# Altium schematic symbol library RK3566_.SCHLIB: 107 symbols (part 1 of 3)
Pins are listed as number, name and electrical type; pins without a type are passive.

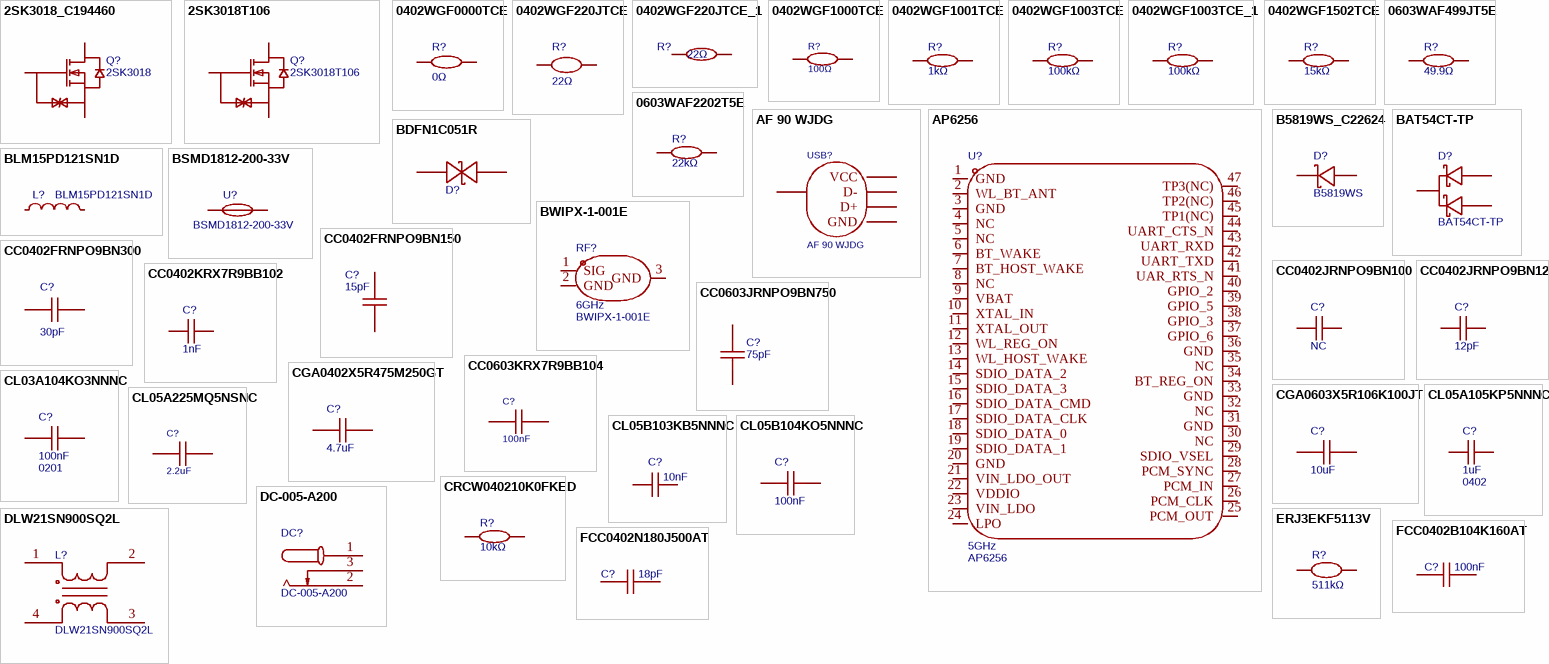
[diagram p0: symbols 2SK3018_C194460 to FCC0402N180J500AT]

## 2SK3018_C194460
designator Q?, comment 2SK3018
类型:N沟道;漏源电压(Vdss):30V;连续漏极电流(Id):100mA;功率(Pd):200mW;导通电阻(RDS(on)@Vgs,Id):8Ω@4V,10mA;阈值电压(Vgs(th)@Id):1.5V@100uA;; Manufacturer: CJ(江苏长电/长晶); Symbol: 2SK3018_C194460; 3D Model: 59529c0d6fc749f28f2d0659e12986b4; 3D Model Transform: 78.74,82.677,0,90,0,0,0.0005,0,0; Type: N沟道; Drain Source Voltage (Vdss): 30V; Continuous Drain Current (Id): 100mA; Power Dissipation (Pd): 200mW; AddInBom: yes; ModelName: SOT-323-3_L2.0-W1.3-H1.0-LS2.1-P1.30; Device: 2SK3018_C194460; LCSC Part Name: N沟道 30V 100mA; Supplier Part: C194460; Manufacturer Part: 2SK3018; Supplier Footprint: SOT-323-3; JLCPCB Part Class: Extended Part; Datasheet: https://atta.szlcsc.com/upload/public/pdf/source/20180612/C194460_7DCC01674DB4E554C67F4CC0517F82F1.pdf; Supplier: LCSC; Drain Source On Resistance (RDS(on)@Vgs,Id): 8Ω@4V,10mA; Gate Threshold Voltage (Vgs(th)@Id): 1.5V@100uA; ConvertToPcb: yes; FootprintName: SOT-323-3_L2.0-W1.3-P1.30-LS2.1-BR
footprint SOT-323-3_L2.0-W1.3-P1.30-LS2.1-BR
3D model SOT-323-3_L2.0-W1.3-H1.0-LS2.1-P1.30
pins: 1 G, 2 S, 3 D

## 2SK3018T106
designator Q?
数量:1个N沟道;漏源电压(Vdss):30V;连续漏极电流(Id):100mA;导通电阻(RDS(on)):13Ω@2.5V;耗散功率(Pd):200mW;阈值电压(Vgs(th)):1.5V;; Manufacturer: ROHM(罗姆); AddInBom: yes; ModelId: 16cdee8f029a4e608a375d4e8ff80303聨0819f05c4eef4c71ace90d822a990e87; ModelName: SOT-323_L2.0-W1.3-P1.30-LS2.1-TR; ModelTransform: 82.677,78.74,0,0,0,0,0,0,0; Number: 1个N沟道; Drain to Source Voltage: 30V; Current - Continuous Drain(Id): 100mA; Pd - Power Dissipation: 200mW; Gate Threshold Voltage (Vgs(th)): 1.5V; Input Capacitance(Ciss): 13pF; Reverse Transfer Capacitance (Crss@Vds): 4pF; Type: N沟道; Output Capacitance(Coss): 9pF; Vgs: ±20V; Symbol: 2SK3018T106; Device: 2SK3018T106; LCSC Part Name: 1个N沟道 耐压:30V 电流:100mA; SupplierPart: C113315; ManufacturerPart: 2SK3018T106; Supplier Footprint: SOT-323; JLCPCB Part Class: Extended Part; Datasheet: https://item.szlcsc.com/datasheet/2SK3018T106/114550.html; Supplier: LCSC; ConvertToPcb: yes; FootprintName: SOT-323_L2.0-W1.3-P1.30-LS2.1-TR; RDS(on): 13Ω@2.5V; Gate Charge(Qg): -; Operating Temperature: -55℃~+150℃; Configuration: -
footprint SOT-323_L2.0-W1.3-P1.30-LS2.1-TR
pins: 1 S, 2 G, 3 D

## 0402WGF0000TCE
designator R?, comment 0Ω
电阻类型:厚膜电阻;阻值:0Ω;精度:±1%;功率:62.5mW;工作电压:50V;温度系数:±800ppm/℃;; Manufacturer: UNI-ROYAL(厚声); Symbol: 0402WGF0000TCE; AddInBom: yes; ModelId: 98c88bc2b9094f218f3a3e30a7012738聨0819f05c4eef4c71ace90d822a990e87; ModelName: R0402_L1.0-W0.5-H0.4; ModelTransform: 39.37,19.685,0,0,0,0,0,0,0; Tolerance: ±1%; Power(Watts): 62.5mW; Voltage-Supply(Max): 50V; Device: 0402WGF0000TCE; LCSC Part Name: 厚膜电阻 0Ω ±1%; SupplierPart: C17168; ManufacturerPart: 0402WGF0000TCE; Supplier Footprint: 0402; JLCPCB Part Class: Basic Part; Datasheet: https://item.szlcsc.com/datasheet/0402WGF0000TCE/17853.html; Supplier: LCSC; ConvertToPcb: yes; FootprintName: R0402; Type: 厚膜电阻; Value: 0Ω; Temperature Coefficient: ±800ppm/℃; Operating Temperature: -55℃~+155℃
footprint R0402
pins: 1, 2

## 0402WGF220JTCE
designator R?, comment 22Ω
电阻类型:厚膜电阻;阻值:22Ω;精度:±1%;功率:62.5mW;温度系数:±100ppm/℃;; Manufacturer: UNI-ROYAL(厚声); Symbol: ERJPA2F22R0X; Device: 0402WGF220JTCE; 3D Model: 671aefced39d4c318694bba8bd8efd39; 3D Model Transform: 39.37,19.685,0,0,0,0,0,0.0005,0; Tolerance: ±1%; Power(Watts): 62.5mW; Overload Voltage (Max): 50V; AddInBom: yes; ModelName: R0402_L1.0-W0.5-H0.5; LCSC Part Name: 厚膜电阻 22Ω ±1% 62.5mW; Supplier Part: C25092; Manufacturer Part: 0402WGF220JTCE; Supplier Footprint: 0402; JLCPCB Part Class: Basic Part; Datasheet: https://atta.szlcsc.com/upload/public/pdf/source/20200306/C422600_1E6D84923E4A46A82E41ADD87F860B5C.pdf; Supplier: LCSC; Type: 厚膜电阻; Value: 22Ω; Temperature Coefficient: ±100ppm/℃; Operating Temperature Range: -55℃~+155℃; ConvertToPcb: yes; FootprintName: R0402
footprint R0402
3D model R0402_L1.0-W0.5-H0.5
pins: 1, 2

## 0402WGF220JTCE_1
designator R?, comment 22Ω
电阻类型:厚膜电阻;阻值:22Ω;精度:±1%;功率:62.5mW;最大工作电压:50V;温度系数:±100ppm/℃;; Manufacturer: UNI-ROYAL(厚声); Symbol: 0402WGF220JTCE; AddInBom: yes; ModelId: 98c88bc2b9094f218f3a3e30a7012738聨0819f05c4eef4c71ace90d822a990e87; ModelName: R0402_L1.0-W0.5-H0.4; ModelTransform: 39.37,19.685,0,0,0,0,0,0,0; Tolerance: ±1%; Power(Watts): 62.5mW; Overload Voltage (Max): 50V; Device: 0402WGF220JTCE; LCSC Part Name: 22Ω ±1% 62.5mW 厚膜电阻; SupplierPart: C25092; ManufacturerPart: 0402WGF220JTCE; Supplier Footprint: 0402; JLCPCB Part Class: Basic Part; Datasheet: https://atta.szlcsc.com/upload/public/pdf/source/20200306/C422600_1E6D84923E4A46A82E41ADD87F860B5C.pdf; Supplier: LCSC; ConvertToPcb: yes; FootprintName: R0402; Type: 厚膜电阻; Value: 22Ω; Temperature Coefficient: ±100ppm/℃; Operating Temperature Range: -55℃~+155℃
footprint R0402
pins: 1, 2

## 0402WGF1000TCE
designator R?, comment 100Ω
电阻类型:厚膜电阻;阻值:100Ω;精度:±1%;功率:62.5mW;工作电压:50V;温度系数:±100ppm/℃;; Manufacturer: UNI-ROYAL(厚声); Symbol: 0402WGF1000TCE; AddInBom: yes; ModelId: 98c88bc2b9094f218f3a3e30a7012738聨0819f05c4eef4c71ace90d822a990e87; ModelName: R0402_L1.0-W0.5-H0.4; ModelTransform: 39.37,19.685,0,0,0,0,0,0,0; Tolerance: ±1%; Power(Watts): 62.5mW; Voltage-Supply(Max): 50V; Device: 0402WGF1000TCE; LCSC Part Name: 厚膜电阻 100Ω ±1%; SupplierPart: C25076; ManufacturerPart: 0402WGF1000TCE; Supplier Footprint: 0402; JLCPCB Part Class: Basic Part; Datasheet: https://item.szlcsc.com/datasheet/0402WGF1000TCE/25819.html; Supplier: LCSC; ConvertToPcb: yes; FootprintName: R0402; Type: 厚膜电阻; Value: 100Ω; Temperature Coefficient: ±100ppm/℃; Operating Temperature: -55℃~+155℃
footprint R0402
pins: 1, 2

## 0402WGF1001TCE
designator R?, comment 1kΩ
电阻类型:厚膜电阻;阻值:1kΩ;精度:±1%;功率:62.5mW;温度系数:±100ppm/℃;最大工作电压:50V;工作温度范围:-55℃~+155℃;; Manufacturer: UNI-ROYAL(厚声); Symbol: 0402WGF1001TCE; 3D Model: 671aefced39d4c318694bba8bd8efd39; 3D Model Transform: 39.37,19.685,0,0,0,0,0,0.0005,0; Tolerance: ±1%; Power(Watts): 62.5mW; Overload Voltage (Max): 50V; AddInBom: yes; ModelName: R0402_L1.0-W0.5-H0.5; Device: 0402WGF1001TCE; LCSC Part Name: 1kΩ ±1% 62.5mW; Supplier Part: C11702; Manufacturer Part: 0402WGF1001TCE; Supplier Footprint: 0402; JLCPCB Part Class: Basic Part; Datasheet: https://atta.szlcsc.com/upload/public/pdf/source/20200306/C422600_1E6D84923E4A46A82E41ADD87F860B5C.pdf; Supplier: LCSC; Type: 厚膜电阻; Value: 1kΩ; Temperature Coefficient: ±100ppm/℃; Operating Temperature Range: -55℃~+155℃; ConvertToPcb: yes; FootprintName: R0402
footprint R0402
3D model R0402_L1.0-W0.5-H0.5
pins: 1, 2

## 0402WGF1003TCE
designator R?, comment 100kΩ
电阻类型:厚膜电阻;阻值:100kΩ;精度:±1%;功率:62.5mW;温度系数:±100ppm/℃;最大工作电压:50V;工作温度范围:-55℃~+155℃;; Manufacturer: UNI-ROYAL(厚声); Symbol: 0402WGF1003TCE; 3D Model: 671aefced39d4c318694bba8bd8efd39; 3D Model Transform: 39.37,19.685,0,0,0,0,0,0.0005,0; Tolerance: ±1%; Power(Watts): 62.5mW; Overload Voltage (Max): 50V; AddInBom: yes; ModelName: R0402_L1.0-W0.5-H0.5; Device: 0402WGF1003TCE; LCSC Part Name: 100kΩ ±1% 62.5mW; Supplier Part: C25741; Manufacturer Part: 0402WGF1003TCE; Supplier Footprint: 0402; JLCPCB Part Class: Basic Part; Datasheet: https://atta.szlcsc.com/upload/public/pdf/source/20200306/C422600_1E6D84923E4A46A82E41ADD87F860B5C.pdf; Supplier: LCSC; Type: 厚膜电阻; Value: 100kΩ; Temperature Coefficient: ±100ppm/℃; Operating Temperature Range: -55℃~+155℃; Voltage-Supply(Max): 50V; Operating Temperature: -55℃~+155℃; ConvertToPcb: yes; FootprintName: R0402
footprint R0402
3D model R0402_L1.0-W0.5-H0.5
pins: 1, 2

## 0402WGF1003TCE_1
designator R?, comment 100kΩ
电阻类型:厚膜电阻;阻值:100kΩ;精度:±1%;功率:62.5mW;工作电压:50V;温度系数:±100ppm/℃;; Manufacturer: UNI-ROYAL(厚声); Symbol: 0402WGF1003TCE; AddInBom: yes; ModelId: 98c88bc2b9094f218f3a3e30a7012738聨0819f05c4eef4c71ace90d822a990e87; ModelName: R0402_L1.0-W0.5-H0.4; ModelTransform: 39.37,19.685,0,0,0,0,0,0,0; Tolerance: ±1%; Power(Watts): 62.5mW; Voltage-Supply(Max): 50V; Device: 0402WGF1003TCE; LCSC Part Name: 厚膜电阻 100kΩ ±1%; SupplierPart: C25741; ManufacturerPart: 0402WGF1003TCE; Supplier Footprint: 0402; JLCPCB Part Class: Basic Part; Datasheet: https://item.szlcsc.com/datasheet/0402WGF1003TCE/26484.html; Supplier: LCSC; ConvertToPcb: yes; FootprintName: R0402; Type: 厚膜电阻; Value: 100kΩ; Temperature Coefficient: ±100ppm/℃; Operating Temperature: -55℃~+155℃
footprint R0402
pins: 1, 2

## 0402WGF1502TCE
designator R?, comment 15kΩ
电阻类型:厚膜电阻;阻值:15kΩ;精度:±1%;功率:62.5mW;最大工作电压:50V;温度系数:±100ppm/℃;; Manufacturer: UNI-ROYAL(厚声); Symbol: 0402WGF1502TCE; AddInBom: yes; ModelId: 98c88bc2b9094f218f3a3e30a7012738聨0819f05c4eef4c71ace90d822a990e87; ModelName: R0402_L1.0-W0.5-H0.4; ModelTransform: 39.37,19.685,0,0,0,0,0,0,0; Tolerance: ±1%; Power(Watts): 62.5mW; Overload Voltage (Max): 50V; Device: 0402WGF1502TCE; LCSC Part Name: 15kΩ ±1% 62.5mW 厚膜电阻; SupplierPart: C25756; ManufacturerPart: 0402WGF1502TCE; Supplier Footprint: 0402; JLCPCB Part Class: Basic Part; Datasheet: https://atta.szlcsc.com/upload/public/pdf/source/20200306/C422600_1E6D84923E4A46A82E41ADD87F860B5C.pdf; Supplier: LCSC; ConvertToPcb: yes; FootprintName: R0402; Type: 厚膜电阻; Value: 15kΩ; Temperature Coefficient: ±100ppm/℃; Operating Temperature Range: -55℃~+155℃
footprint R0402
pins: 1, 2

## 0603WAF499JT5E
designator R?, comment 49.9Ω
电阻类型:厚膜电阻;阻值:49.9Ω;精度:±1%;功率:100mW;工作电压:75V;温度系数:±100ppm/℃;; Manufacturer: UNI-ROYAL(厚声); Symbol: 0603WAF499JT5E; AddInBom: yes; ModelId: fc143cca1e79419f9cd78b61e9279f08聨0819f05c4eef4c71ace90d822a990e87; ModelName: R0603; ModelTransform: 31.8897,63.7794,0,90,0,0,0,0,0; Tolerance: ±1%; Power(Watts): 100mW; Voltage-Supply(Max): 75V; Device: 0603WAF499JT5E; LCSC Part Name: 49.9Ω ±1% 100mW 厚膜电阻; SupplierPart: C23185; ManufacturerPart: 0603WAF499JT5E; Supplier Footprint: 0603; JLCPCB Part Class: Basic Part; Datasheet: https://item.szlcsc.com/datasheet/0603WAF499JT5E/23912.html; Supplier: LCSC; ConvertToPcb: yes; FootprintName: R0603; Type: 厚膜电阻; Value: 49.9Ω; Temperature Coefficient: ±100ppm/℃; Operating Temperature: -55℃~+155℃
footprint R0603
pins: 1, 2

## 0603WAF2202T5E
designator R?, comment 22kΩ
电阻类型:厚膜电阻;阻值:22kΩ;精度:±1%;功率:100mW;工作电压:75V;温度系数:±100ppm/℃;; Manufacturer: UNI-ROYAL(厚声); Symbol: 0603WAF2202T5E; AddInBom: yes; ModelId: fc143cca1e79419f9cd78b61e9279f08聨0819f05c4eef4c71ace90d822a990e87; ModelName: R0603; ModelTransform: 31.8897,63.7794,0,90,0,0,0,0,0; Tolerance: ±1%; Power(Watts): 100mW; Voltage-Supply(Max): 75V; Device: 0603WAF2202T5E; LCSC Part Name: 22kΩ ±1% 100mW 厚膜电阻; SupplierPart: C31850; ManufacturerPart: 0603WAF2202T5E; Supplier Footprint: 0603; JLCPCB Part Class: Basic Part; Datasheet: https://item.szlcsc.com/datasheet/0603WAF2202T5E/32812.html; Supplier: LCSC; ConvertToPcb: yes; FootprintName: R0603; Type: 厚膜电阻; Value: 22kΩ; Temperature Coefficient: ±100ppm/℃; Operating Temperature: -55℃~+155℃
footprint R0603
pins: 1, 2

## AF 90 WJDG
designator USB?
连接器类型:Type-A;协议标准:USB 2.0;公母:母;安装方式:弯插;触点数量:4P;端口数量:1;额定电流 - 电源:1.5A;工作温度:-25℃~+85℃;; Manufacturer: SHOU HAN(首韩); Symbol: AF 90° WJDG; AddInBom: yes; ModelId: 268f7f19b8674295a50f5e7a4a3dee80聨0819f05c4eef4c71ace90d822a990e87; ModelName: USB-A-TH_4P-L14.5-W14.0-H7.6-S2.71; ModelTransform: 610.19406,551.18,0,0,0,0,0,-192.915,-149.606; Connector Type: Type-A; Protocol Standard: USB 2.0; Gender: 母; Number of Contacts: 4P; Number of Ports: 1; Current Rating-Power: 1.5A; Voltage Rating: 30V; Connect-Disconnect Life: 5千次; Detection color: 白色; Device: AF 90 WJDG; LCSC Part Name: Type-A弯插母座; SupplierPart: C456018; ManufacturerPart: AF 90 WJDG; Supplier Footprint: 弯插; JLCPCB Part Class: Extended Part; Datasheet: https://item.szlcsc.com/datasheet/AF%252090%2520WJDG/458825.html; Supplier: LCSC; ConvertToPcb: yes; FootprintName: USB-A-TH_AF-WJDG; Mounting Type: 弯插; Supplementary Features: -; Center Height: -; Length: 14mm; Operating Temperature: -25℃~+85℃
footprint USB-A-TH_AF-WJDG
pins: 1 VCC, 2 D-, 3 D+, 4 GND, 5 SHLD

## AP6256
designator U?, comment 5GHz  Device: AP6256
核心芯片:BCM43456;频率:5GHz;发射功率:17dBm;接收灵敏度:-96dBm;; Manufacturer: AMPAK(正基科技); AddInBom: yes; Wireless Standard: IEEE802.11b/g/n；Bluetooth5.2; Interface Type: GPIO；PCM；SDIO；UART; Output Power: 17dBm; Voltage - Supply: 3.2V~4.8V; Sensitivity: -96dBm; Symbol: AP6256; LCSC Part Name: WIFI模块; SupplierPart: C5248079; ManufacturerPart: AP6256; Supplier Footprint: QFN-44(12x12); JLCPCB Part Class: Extended Part; Datasheet: https://item.szlcsc.com/datasheet/AP6256/5960630.html; Supplier: LCSC; ConvertToPcb: yes; FootprintName: QFN-44_L12.0-W12.0-P0.90-TL_AP6256; Utilized IC / Part: BCM43456; Value: 5GHz; Operating Temperature: -30℃~+85℃; Features: 集成蓝牙功能
footprint QFN-44_L12.0-W12.0-P0.90-TL_AP6256
pins: 1 GND, 2 WL_BT_ANT, 3 GND, 4 NC, 5 NC, 6 BT_WAKE, 7 BT_HOST_WAKE, 8 NC, 9 VBAT, 10 XTAL_IN, 11 XTAL_OUT, 12 WL_REG_ON, 13 WL_HOST_WAKE, 14 SDIO_DATA_2, 15 SDIO_DATA_3, 16 SDIO_DATA_CMD, 17 SDIO_DATA_CLK, 18 SDIO_DATA_0, 19 SDIO_DATA_1, 20 GND, 21 VIN_LDO_OUT, 22 VDDIO, 23 VIN_LDO, 24 LPO, 25 PCM_OUT, 26 PCM_CLK, 27 PCM_IN, 28 PCM_SYNC, 29 SDIO_VSEL, 30 NC, 31 GND, 32 NC, 33 GND, 34 BT_REG_ON, 35 NC, 36 GND, 37 GPIO_6, 38 GPIO_3, 39 GPIO_5, 40 GPIO_2, 41 UAR_RTS_N, 42 UART_TXD, 43 UART_RXD, 44 UART_CTS_N, 45 TP1(NC), 46 TP2(NC), 47 TP3(NC)

## B5819WS_C22624
designator D?, comment B5819WS
直流反向耐压(Vr):40V;平均整流电流(Io):1A;正向压降(Vf):600mV@1A;; Manufacturer: CJ(江苏长电/长晶); Symbol: B5819WS_C22624; 3D Model: e9dd044ee7bf4221b3b795eb56bce7c0; 3D Model Transform: 98.91933,51.181,0,180,0,0,0.985,-0.0005,0; Reverse Voltage (Vr): 40V; Average Rectified Current (Io): 1A; AddInBom: yes; ModelName: SOD-323_L1.7-W1.3-H1.1-LS2.5; Device: B5819WS_C22624; LCSC Part Name: 40V 1A 600mV@1A; Supplier Part: C22624; Manufacturer Part: B5819WS; Supplier Footprint: SOD-323; JLCPCB Part Class: Extended Part; Datasheet: https://atta.szlcsc.com/upload/public/pdf/source/20170919/C22624_1505799673448977596.pdf; Supplier: LCSC; Forward Voltage (Vf@If): 600mV@1A; ConvertToPcb: yes; FootprintName: SOD-323_L1.8-W1.3-LS2.5-RD
footprint SOD-323_L1.8-W1.3-LS2.5-RD
3D model SOD-323_L1.7-W1.3-H1.1-LS2.5
pins: 1 K, 2 A

## BAT54CT-TP
designator D?
二极管配置:1对共阴极;正向压降(Vf):1V@100mA;直流反向耐压(Vr):30V;整流电流:200mA;; Manufacturer: MCC(美微科); AddInBom: yes; ModelId: 3e7fadd59d8d474faa89c2c7e0676879聨0819f05c4eef4c71ace90d822a990e87; ModelName: SOT-523-3P_L1.6-W0.8-H0.9-LS1.6-P0.50; ModelTransform: 63.48633,62.992,0,180,0,0,0,0,0; Diode Configuration: 1对共阴极; Voltage - DC Reverse(Vr): 30V; Current - Rectified: 200mA; Reverse Leakage Current (Ir): 2uA@25V; Symbol: BAT54CT-TP; Device: BAT54CT-TP; LCSC Part Name: 电压:30V 电流:200mA; SupplierPart: C725562; ManufacturerPart: BAT54CT-TP; Supplier Footprint: SOT-523-3; JLCPCB Part Class: Extended Part; Datasheet: https://item.szlcsc.com/datasheet/BAT54CT-TP/771875.html; Supplier: LCSC; ConvertToPcb: yes; FootprintName: SOT-523-3_L1.6-W0.8-P1.00-LS1.6-BR; Voltage - Forward(Vf@If): 1V@100mA
footprint SOT-523-3_L1.6-W0.8-P1.00-LS1.6-BR
pins: 1, 2, 3

## BDFN1C051R
designator D?  (value not drawn)
极性:双向;反向截止电压(Vrwm):5V;钳位电压:13V;峰值脉冲电流(Ipp):4A@8/20us;击穿电压(VBR):5.5V;; Manufacturer: BORN(伯恩半导体); AddInBom: yes; ModelId: 295ccb0e91f84fca9fcc42e8f031306b聨0819f05c4eef4c71ace90d822a990e87; ModelName: DFN0603-D_L0.6-W0.3--H0.3-P0.34-BI; ModelTransform: 24.0157,12.2047,0,0,0,0,0,0,0; Polarity: 双向; Reverse Stand-Off Voltage (Vrwm): 5V; Clamping Voltage: 13V; Voltage - Breakdown: 5.5V; Reverse Leakage Current (Ir): 100nA; Number of Channels: 单路; level of protection: IEC 61000-4-4；IEC 61000-4-5；IEC 61000-4-2; Type: ESD; Junction Capacitance: 0.2pF; Symbol: BDFN1C051R; Device: BDFN1C051R; LCSC Part Name: 双向ESD 5V截止 峰值脉冲电流：4A@8/20us; SupplierPart: C152032; ManufacturerPart: BDFN1C051R; Supplier Footprint: DFN0603-D; JLCPCB Part Class: Extended Part; Datasheet: https://item.szlcsc.com/datasheet/BDFN1C051R/163372.html; Supplier: LCSC; ConvertToPcb: yes; FootprintName: DFN0603-D_L0.6-W0.3-P0.34-BI; Peak Pulse Current (Ipp): 4A@8/20us
footprint DFN0603-D_L0.6-W0.3-P0.34-BI
pins: 1, 2

## BLM15PD121SN1D
designator L?
阻抗@频率:120Ω@100MHz;误差:±25%;直流电阻(DCR):90mΩ;; Manufacturer: muRata(村田); AddInBom: yes; ModelId: d8d36575a3234d4790bfa765c88664a7聨0819f05c4eef4c71ace90d822a990e87; ModelName: L0402_L1.0-W0.5-H0.5_BEAD; ModelTransform: 39.37,19.685,0,0,0,0,0,0.0005,0; Tolerance: ±25%; DC Resistance(DCR): 90mΩ; Current Rating: 1.3A; Number of Circuits: 1; Symbol: BLM15PD121SN1D; Device: BLM15PD121SN1D; LCSC Part Name: 单路 0402磁珠 阻抗120Ω@100MHz; SupplierPart: C76891; ManufacturerPart: BLM15PD121SN1D; Supplier Footprint: 0402; JLCPCB Part Class: Extended Part; Datasheet: https://item.szlcsc.com/datasheet/BLM15PD121SN1D/78018.html; Supplier: LCSC; ConvertToPcb: yes; FootprintName: L0402; Impedance @ Frequency: 120Ω@100MHz; Operating Temperature: -55℃~+125℃
footprint L0402
pins: 1, 2

## BSMD1812-200-33V
designator U?
耐压(Vmax):33V;最大电流(Imax):40A;保持电流(Ihold):2A;跳闸电流(Itrip):4A;; Manufacturer: BHFUSE(佰宏); AddInBom: yes; ModelId: bca21e458c564d38b781621ca22e660b聨0819f05c4eef4c71ace90d822a990e87; ModelName: F1812_L4.5-W3.2-H1.0; ModelTransform: 177.165,125.984,0,0,0,0,0.0005,0,0; Voltage - Max: 33V; Current - Max: 40A; Hold Current: 2A; Trip Current: 4A; Power Dissipation: 1W; Resistance - Initial (Ri) (Min): 20mΩ; Resistance - Post Trip (R1) (Max): 100mΩ; Time to Trip(Max): 2s; Symbol: BSMD1812-200-33V; Device: BSMD1812-200-33V; LCSC Part Name: 1812 2A 33V 自恢复; SupplierPart: C7433877; ManufacturerPart: BSMD1812-200-33V; Supplier Footprint: 1812; JLCPCB Part Class: Extended Part; Datasheet: https://item.szlcsc.com/datasheet/BSMD1812-200-33V/8443524.html; Supplier: LCSC; ConvertToPcb: yes; FootprintName: F1812; Operating Temperature: -40℃~+85℃; Length: 4.73mm; Width: 3.41mm; Height: 1.5mm; Pitch: -
footprint F1812
pins: 1, 2

## BWIPX-1-001E
designator RF?, comment 6GHz  Device: BWIPX-1-001E
连接器类型:板端;接口类型:内针;端口数量:1;接口直径:2mm;接口长度/高度:1.25mm;频率:6GHz;射频系列:IPEX;阻抗:50Ω;样式:-;工作温度:-40℃~+85℃;; Manufacturer: BAT WIRELESS(蝙蝠无线); AddInBom: yes; ModelId: e9910d1cc3f644ef905f39c3184653d7聨0819f05c4eef4c71ace90d822a990e87; ModelName: IPEX-SMD_BWIPX-1-001E; ModelTransform: 122.047,118.11,0,180,0,0,29.921,0,0; Connector Type: 板端; Interface: 内针; Number of Ports: 1; Interface Diameter: 2mm; Interface Length/Height: 1.25mm; RF Series: IPEX; Impedance: 50Ω; Symbol: BWIPX-1-001E; LCSC Part Name: 内针 IPEX; SupplierPart: C496552; ManufacturerPart: BWIPX-1-001E; Supplier Footprint: SMD; JLCPCB Part Class: Extended Part; Datasheet: https://item.szlcsc.com/datasheet/BWIPX-1-001E/508501.html; Supplier: LCSC; ConvertToPcb: yes; FootprintName: IPEX-SMD_BWIPX-1-001E; Value: 6GHz; Style: -; Operating Temperature Range: -40℃~+85℃
footprint IPEX-SMD_BWIPX-1-001E
pins: 1 SIG, 2 GND, 3 GND

## CC0402FRNPO9BN150
designator C?, comment 15pF
容值:15pF;精度:±1%;额定电压:50V;温度系数:NP0;; Manufacturer: YAGEO(国巨); Symbol: CC0402FRNPO9BN150; AddInBom: yes; ModelId: 36a51122f27c49738f86b3bfa98863e0聨0819f05c4eef4c71ace90d822a990e87; ModelName: C0402_L1.0-W0.5-H0.5; ModelTransform: 39.37,19.685,0,0,0,0,0,0,0; Tolerance: ±1%; Voltage Rating: 50V; Temperature Coefficient: NP0; Device: CC0402FRNPO9BN150; LCSC Part Name: 15pF ±1% 50V; SupplierPart: C326803; ManufacturerPart: CC0402FRNPO9BN150; Supplier Footprint: 0402; JLCPCB Part Class: Extended Part; Datasheet: https://item.szlcsc.com/datasheet/CC0402FRNPO9BN150/306897.html; Supplier: LCSC; ConvertToPcb: yes; FootprintName: C0402; Value: 15pF
footprint C0402
pins: 1, 2

## CC0402FRNPO9BN300
designator C?, comment 30pF
容值:30pF;精度:±1%;额定电压:50V;材质(温度系数):NP0;; Manufacturer: YAGEO(国巨); Symbol: CC0402FRNPO9BN300; AddInBom: yes; ModelId: 36a51122f27c49738f86b3bfa98863e0聨0819f05c4eef4c71ace90d822a990e87; ModelName: C0402_L1.0-W0.5-H0.5; ModelTransform: 39.37,19.685,0,0,0,0,0,0,0; Tolerance: ±1%; Voltage Rated: 50V; Temperature Coefficient: NP0; Device: CC0402FRNPO9BN300; LCSC Part Name: 30pF ±1% 50V; SupplierPart: C526980; ManufacturerPart: CC0402FRNPO9BN300; Supplier Footprint: 0402; JLCPCB Part Class: Extended Part; Datasheet: https://atta.szlcsc.com/upload/public/pdf/source/20200508/C526980_8BD9B2380CFF3BD9993DEB032B356E9B.pdf; Supplier: LCSC; ConvertToPcb: yes; FootprintName: C0402; Value: 30pF
footprint C0402
pins: 1, 2

## CC0402JRNPO9BN100
designator C?, comment NC
容值:10pF;精度:±5%;额定电压:50V;温度系数:NP0;; Manufacturer: YAGEO(国巨); Symbol: CC0402JRNPO9BN100; AddInBom: yes; ModelId: 36a51122f27c49738f86b3bfa98863e0聨0819f05c4eef4c71ace90d822a990e87; ModelName: C0402_L1.0-W0.5-H0.5; ModelTransform: 39.37,19.685,0,0,0,0,0,0,0; Tolerance: ±5%; Voltage Rating: 50V; Temperature Coefficient: NP0; Device: CC0402JRNPO9BN100; Value: NC; LCSC Part Name: 10pF ±5% 50V; ManufacturerPart: CC0402JRNPO9BN100; Supplier Footprint: 0402; JLCPCB Part Class: Extended Part; Datasheet: https://item.szlcsc.com/datasheet/CC0402JRNPO9BN100/107414.html; Supplier: LCSC; ConvertToPcb: yes; FootprintName: C0402
footprint C0402
pins: 1, 2

## CC0402JRNPO9BN120
designator C?, comment 12pF
容值:12pF;精度:±5%;额定电压:50V;温度系数:NP0;; Manufacturer: YAGEO(国巨); Symbol: CC0402JRNPO9BN120; AddInBom: yes; ModelId: 36a51122f27c49738f86b3bfa98863e0聨0819f05c4eef4c71ace90d822a990e87; ModelName: C0402_L1.0-W0.5-H0.5; ModelTransform: 39.37,19.685,0,0,0,0,0,0,0; Tolerance: ±5%; Voltage Rating: 50V; Temperature Coefficient: NP0; Device: CC0402JRNPO9BN120; LCSC Part Name: 12pF ±5% 50V; SupplierPart: C106201; ManufacturerPart: CC0402JRNPO9BN120; Supplier Footprint: 0402; JLCPCB Part Class: Extended Part; Datasheet: https://item.szlcsc.com/datasheet/CC0402JRNPO9BN120/107416.html; Supplier: LCSC; ConvertToPcb: yes; FootprintName: C0402; Value: 12pF
footprint C0402
pins: 1, 2

## CC0402KRX7R9BB102
designator C?, comment 1nF
容值:1nF;精度:±10%;额定电压:50V;材质(温度系数):X7R;; Manufacturer: YAGEO(国巨); Symbol: CC0402KRX7R9BB102; AddInBom: yes; ModelId: 36a51122f27c49738f86b3bfa98863e0聨0819f05c4eef4c71ace90d822a990e87; ModelName: C0402_L1.0-W0.5-H0.5; ModelTransform: 39.37,19.685,0,0,0,0,0,0,0; Tolerance: ±10%; Voltage Rated: 50V; Temperature Coefficient: X7R; Device: CC0402KRX7R9BB102; LCSC Part Name: 1nF ±10% 50V; SupplierPart: C106205; ManufacturerPart: CC0402KRX7R9BB102; Supplier Footprint: 0402; JLCPCB Part Class: Extended Part; Datasheet: https://atta.szlcsc.com/upload/public/pdf/source/20181008/C309510_22F155564471FAF6A489F7D68F34234E.pdf; Supplier: LCSC; ConvertToPcb: yes; FootprintName: C0402; Value: 1nF
footprint C0402
pins: 1, 2

## CC0603JRNPO9BN750
designator C?, comment 75pF
容值:75pF;精度:±5%;额定电压:50V;温度系数:NP0;; Manufacturer: YAGEO(国巨); Symbol: CC0603JRNPO9BN750; AddInBom: yes; ModelId: ac125912035d415993ca9572d50418b1聨0819f05c4eef4c71ace90d822a990e87; ModelName: C0603_L1.6-W0.8-H0.8; ModelTransform: 62.992,31.496,0,0,0,0,0,0,0; Tolerance: ±5%; Voltage Rating: 50V; Temperature Coefficient: NP0; Device: CC0603JRNPO9BN750; LCSC Part Name: 75pF ±5% 50V; SupplierPart: C282074; ManufacturerPart: CC0603JRNPO9BN750; Supplier Footprint: 0603; JLCPCB Part Class: Extended Part; Datasheet: https://item.szlcsc.com/datasheet/CC0603JRNPO9BN750/268161.html; Supplier: LCSC; ConvertToPcb: yes; FootprintName: C0603; Value: 75pF
footprint C0603
pins: 1, 2

## CC0603KRX7R9BB104
designator C?, comment 100nF
容值:100nF;精度:±10%;额定电压:50V;温度系数:X7R;; Manufacturer: YAGEO(国巨); Symbol: CC0603KRX7R9BB104; AddInBom: yes; ModelId: ac125912035d415993ca9572d50418b1聨0819f05c4eef4c71ace90d822a990e87; ModelName: C0603_L1.6-W0.8-H0.8; ModelTransform: 62.992,31.496,0,0,0,0,0,0,0; Tolerance: ±10%; Voltage Rating: 50V; Temperature Coefficient: X7R; Device: CC0603KRX7R9BB104; LCSC Part Name: 100nF ±10% 50V; SupplierPart: C14663; ManufacturerPart: CC0603KRX7R9BB104; Supplier Footprint: 0603; JLCPCB Part Class: Basic Part; Datasheet: https://item.szlcsc.com/datasheet/CC0603KRX7R9BB104/15331.html; Supplier: LCSC; ConvertToPcb: yes; FootprintName: C0603; Value: 100nF
footprint C0603
pins: 1, 2

## CGA0402X5R475M250GT
designator C?, comment 4.7uF
容值:4.7uF;精度:±20%;额定电压:25V;温度系数:X5R;; Manufacturer: HRE(芯声); Symbol: CGA0402X5R475M250GT; 3D Model: 36a51122f27c49738f86b3bfa98863e0聨0819f05c4eef4c71ace90d822a990e87; 3D Model Transform: 39.37,19.685,0,0,0,0,0,0,0; Tolerance: ±20%; Voltage Rating: 25V; Temperature Coefficient: X5R; AddInBom: yes; ModelName: C0402_L1.0-W0.5-H0.5; Device: CGA0402X5R475M250GT; LCSC Part Name: 4.7uF ±20% 25V; Supplier Part: C6119795; Manufacturer Part: CGA0402X5R475M250GT; Supplier Footprint: 0402; JLCPCB Part Class: Extended Part; Datasheet: https://item.szlcsc.com/datasheet/CGA0402X5R475M250GT/7062501.html; Supplier: LCSC; Value: 4.7uF; ConvertToPcb: yes; FootprintName: C0402
footprint C0402
3D model C0402_L1.0-W0.5-H0.5
pins: 1, 2

## CGA0603X5R106K100JT
designator C?, comment 10uF
容值:10uF;精度:±10%;额定电压:10V;温度系数:X5R;; Manufacturer: HRE(芯声); Symbol: CGA0603X5R106K100JT; AddInBom: yes; ModelId: ac125912035d415993ca9572d50418b1聨0819f05c4eef4c71ace90d822a990e87; ModelName: C0603_L1.6-W0.8-H0.8; ModelTransform: 62.992,31.496,0,0,0,0,0,0,0; Tolerance: ±10%; Voltage Rating: 10V; Temperature Coefficient: X5R; Device: CGA0603X5R106K100JT; LCSC Part Name: 10uF ±10% 10V; SupplierPart: C6119842; ManufacturerPart: CGA0603X5R106K100JT; Supplier Footprint: 0603; JLCPCB Part Class: Extended Part; Datasheet: https://item.szlcsc.com/datasheet/CGA0603X5R106K100JT/7062548.html; Supplier: LCSC; ConvertToPcb: yes; FootprintName: C0603; Value: 10uF
footprint C0603
pins: 1, 2

## CL03A104KO3NNNC
designator C?, comment 100nF  Supplier Footprint: 0201
容值:100nF;精度:±10%;额定电压:16V;材质(温度系数):X5R;; Manufacturer: SAMSUNG(三星); Symbol: CL05B104KB54PNC; Device: CL03A104KO3NNNC; 3D Model: e8033a7cb35143ffb28e3b81b2577ea0; 3D Model Transform: 23.622,11.811,0,0,0,0,0,0,0; Tolerance: ±10%; Voltage Rated: 16V; Temperature Coefficient: X5R; AddInBom: yes; ModelName: C0201_L0.6-W0.3-H0.3; JLCPCB Part Class: Extended Part; LCSC Part Name: 100nF ±10% 16V; Supplier Part: C307380; Manufacturer Part: CL03A104KO3NNNC; Datasheet: https://atta.szlcsc.com/upload/public/pdf/source/20181009/C307380_E0679AAF9658ADA26DBF30CED0CA6925.pdf; Supplier: LCSC; Value: 100nF; ConvertToPcb: yes; FootprintName: C0201
footprint C0201
3D model C0201_L0.6-W0.3-H0.3
pins: 1, 2

## CL05A105KP5NNNC
designator C?, comment 1uF  Supplier Footprint: 0402
容值:1uF;精度:±10%;额定电压:10V;材质(温度系数):X5R;; Manufacturer: SAMSUNG(三星); Symbol: CL05A105KP5NNNC; 3D Model: 36a51122f27c49738f86b3bfa98863e0; 3D Model Transform: 39.37,19.685,0,0,0,0,0,0,0; Tolerance: ±10%; Voltage Rated: 10V; Temperature Coefficient: X5R; AddInBom: yes; ModelName: C0402_L1.0-W0.5-H0.5; Device: CL05A105KP5NNNC; LCSC Part Name: 1uF ±10% 10V; Supplier Part: C14445; Manufacturer Part: CL05A105KP5NNNC; JLCPCB Part Class: 扩展库; Datasheet: https://atta.szlcsc.com/upload/public/pdf/source/20160103/1457707670698.pdf; Supplier: LCSC; Value: 1uF; ConvertToPcb: yes; FootprintName: C0402
footprint C0402
3D model C0402_L1.0-W0.5-H0.5
pins: 1, 2

## CL05A225MQ5NSNC
designator C?, comment 2.2uF
容值:2.2uF;精度:±20%;额定电压:6.3V;温度系数:X5R;; Manufacturer: SAMSUNG(三星); Symbol: CL05A225MQ5NSNC; AddInBom: yes; ModelId: 36a51122f27c49738f86b3bfa98863e0聨0819f05c4eef4c71ace90d822a990e87; ModelName: C0402_L1.0-W0.5-H0.5; ModelTransform: 39.37,19.685,0,0,0,0,0,0,0; Tolerance: ±20%; Voltage Rating: 6.3V; Temperature Coefficient: X5R; Device: CL05A225MQ5NSNC; LCSC Part Name: 2.2uF ±20% 6.3V; SupplierPart: C12530; ManufacturerPart: CL05A225MQ5NSNC; Supplier Footprint: 0402; JLCPCB Part Class: Basic Part; Datasheet: https://item.szlcsc.com/datasheet/CL05A225MQ5NSNC/13164.html; Supplier: LCSC; ConvertToPcb: yes; FootprintName: C0402; Value: 2.2uF
footprint C0402
pins: 1, 2

## CL05B103KB5NNNC
designator C?, comment 10nF
容值:10nF;精度:±10%;额定电压:50V;温度系数:X7R;; Manufacturer: SAMSUNG(三星); Symbol: CL05B103KB5NNNC; AddInBom: yes; ModelId: 36a51122f27c49738f86b3bfa98863e0聨0819f05c4eef4c71ace90d822a990e87; ModelName: C0402_L1.0-W0.5-H0.5; ModelTransform: 39.37,19.685,0,0,0,0,0,0,0; Tolerance: ±10%; Voltage Rating: 50V; Temperature Coefficient: X7R; Device: CL05B103KB5NNNC; LCSC Part Name: 10nF ±10% 50V; SupplierPart: C15195; ManufacturerPart: CL05B103KB5NNNC; Supplier Footprint: 0402; JLCPCB Part Class: Basic Part; Datasheet: https://item.szlcsc.com/datasheet/CL05B103KB5NNNC/15869.html; Supplier: LCSC; ConvertToPcb: yes; FootprintName: C0402; Value: 10nF
footprint C0402
pins: 1, 2

## CL05B104KO5NNNC
designator C?, comment 100nF
容值:100nF;精度:±10%;额定电压:16V;温度系数:X7R;; Manufacturer: SAMSUNG(三星); Symbol: CL05B104KO5NNNC; 3D Model: 36a51122f27c49738f86b3bfa98863e0聨0819f05c4eef4c71ace90d822a990e87; 3D Model Transform: 39.37,19.685,0,0,0,0,0,0,0; Tolerance: ±10%; Voltage Rating: 16V; Temperature Coefficient: X7R; AddInBom: yes; ModelName: C0402_L1.0-W0.5-H0.5; Device: CL05B104KO5NNNC; LCSC Part Name: 100nF ±10% 16V; Supplier Part: C1525; Manufacturer Part: CL05B104KO5NNNC; Supplier Footprint: 0402; JLCPCB Part Class: Basic Part; Datasheet: https://item.szlcsc.com/datasheet/CL05B104KO5NNNC/1877.html; Supplier: LCSC; Value: 100nF; ConvertToPcb: yes; FootprintName: C0402
footprint C0402
3D model C0402_L1.0-W0.5-H0.5
pins: 1, 2

## CRCW040210K0FKED
designator R?, comment 10kΩ
电阻类型:厚膜电阻;阻值:10kΩ;精度:±1%;功率:63mW;温度系数:±100ppm/K;最大工作电压:50V;工作温度范围:-55℃~+155℃;; Manufacturer: VISHAY(威世); Symbol: CRCW040210K0FKED; 3D Model: 671aefced39d4c318694bba8bd8efd39; 3D Model Transform: 39.37,19.685,0,0,0,0,0,0.0005,0; Tolerance: ±1%; Power(Watts): 63mW; Overload Voltage (Max): 50V; AddInBom: yes; ModelName: R0402_L1.0-W0.5-H0.5; Device: CRCW040210K0FKED; LCSC Part Name: 10kΩ ±1% 63mW; Supplier Part: C71617; Manufacturer Part: CRCW040210K0FKED; Supplier Footprint: 0402; JLCPCB Part Class: 扩展库; Datasheet: https://atta.szlcsc.com/upload/public/pdf/source/20180224/C71617_15194370300791364062.pdf; Supplier: LCSC; Type: 厚膜电阻; Value: 10kΩ; Temperature Coefficient: ±100ppm/K; Operating Temperature Range: -55℃~+155℃; ConvertToPcb: yes; FootprintName: R0402
footprint R0402
3D model R0402_L1.0-W0.5-H0.5
pins: 1, 2

## DC-005-A200
designator DC?
连接器类型:DC电源插座;安装方式:弯插;触点内径:2mm;触点外径:6.4mm;额定电流:3A;额定电压:30V;工作温度:-20℃~+70℃;; Manufacturer: XUNPU(讯普); AddInBom: yes; ModelId: 1321cdbe1dc84555a9684967491c8670聨0819f05c4eef4c71ace90d822a990e87; ModelName: DC-IN-TH_DC-005-A200; ModelTransform: 553.149,368.14887,0,0,0,0,-137.795,85.63,-161.417; Connector Type: DC电源插座; Inside Contact Diameter: 2mm; Outside Contact Diameter: 6.4mm; Current Rating: 3A; Voltage Rating (Max): 30V; Body Height: 11mm; Symbol: DC-005-A200; Device: DC-005-A200; LCSC Part Name: DC电源插座 内径:2mm 外径:6.4mm; SupplierPart: C720557; ManufacturerPart: DC-005-A200; Supplier Footprint: 插件; JLCPCB Part Class: Extended Part; Datasheet: https://item.szlcsc.com/datasheet/DC-005-A200/763564.html; Supplier: LCSC; ConvertToPcb: yes; FootprintName: DC-IN-TH_DC-005-A200; Mounting Type: 弯插; Length: 14mm; Width: 9mm; Operating Temperature: -20℃~+70℃
footprint DC-IN-TH_DC-005-A200
pins: 1, 2, 3

## DLW21SN900SQ2L
designator L?
通道数:2;阻抗@频率:90Ω@100MHz;直流电阻(DCR):-;; Manufacturer: muRata(村田); AddInBom: yes; ModelId: 2ee9896fb24849a1ae3ad995e0a10c07聨0819f05c4eef4c71ace90d822a990e87; ModelName: SMD-4_L2.0-W1.2-H1.3; ModelTransform: 79.527,47.244,0,90,0,0,0,0,0; Number of Lines: 2; Current Rating: 330mA; Symbol: DLW21SN900SQ2L; Device: DLW21SN900SQ2L; LCSC Part Name: 两路 贴片共模滤波器 阻抗90Ω@100MHz; SupplierPart: C97856; ManufacturerPart: DLW21SN900SQ2L; Supplier Footprint: SMD-4P,2x1.2mm; JLCPCB Part Class: Extended Part; Datasheet: https://item.szlcsc.com/datasheet/DLW21SN900SQ2L/99065.html; Supplier: LCSC; ConvertToPcb: yes; FootprintName: FILTER-SMD_4P-L2.0-W1.2-BL_DLW21H; Voltage Rating - DC: -; Impedance @ Frequency: 90Ω@100MHz; DC Resistance(DCR): -; Operating Temperature: -40℃~+85℃
footprint FILTER-SMD_4P-L2.0-W1.2-BL_DLW21H
pins: 1, 2, 3, 4

## ERJ3EKF5113V
designator R?, comment 511kΩ
电阻类型:厚膜电阻;阻值:511kΩ;精度:±1%;功率:100mW;工作电压:75V;温度系数:±100ppm/℃;; Manufacturer: PANASONIC(松下); Symbol: ERJ3EKF5113V; AddInBom: yes; ModelId: fc143cca1e79419f9cd78b61e9279f08聨0819f05c4eef4c71ace90d822a990e87; ModelName: R0603; ModelTransform: 31.8897,63.7794,0,90,0,0,0,0,0; Tolerance: ±1%; Power(Watts): 100mW; Voltage-Supply(Max): 75V; Device: ERJ3EKF5113V; LCSC Part Name: 厚膜电阻 511kΩ ±1% 100mW; SupplierPart: C403259; ManufacturerPart: ERJ3EKF5113V; Supplier Footprint: 0603; JLCPCB Part Class: Extended Part; Datasheet: https://item.szlcsc.com/datasheet/ERJ3EKF5113V/389058.html; Supplier: LCSC; ConvertToPcb: yes; FootprintName: R0603; Type: 厚膜电阻; Value: 511kΩ; Temperature Coefficient: ±100ppm/℃; Operating Temperature: -55℃~+155℃
footprint R0603
pins: 1, 2

## FCC0402B104K160AT
designator C?, comment 100nF
容值:100nF;精度:±10%;额定电压:16V;温度系数:X7R;; Manufacturer: FOJAN(富捷); Symbol: FCC0402B104K160AT; AddInBom: yes; ModelId: 36a51122f27c49738f86b3bfa98863e0聨0819f05c4eef4c71ace90d822a990e87; ModelName: C0402_L1.0-W0.5-H0.5; ModelTransform: 39.37,19.685,0,0,0,0,0,0,0; Tolerance: ±10%; Voltage Rating: 16V; Temperature Coefficient: X7R; Device: FCC0402B104K160AT; LCSC Part Name: 100nF ±10% 16V; SupplierPart: C5137468; ManufacturerPart: FCC0402B104K160AT; Supplier Footprint: 0402; JLCPCB Part Class: Extended Part; Datasheet: https://item.szlcsc.com/datasheet/FCC0402B104K160AT/5746970.html; Supplier: LCSC; ConvertToPcb: yes; FootprintName: C0402; Value: 100nF; Operating Temperature: -55℃~+125℃
footprint C0402
pins: 1, 2

## FCC0402N180J500AT
designator C?, comment 18pF
容值:18pF;精度:±5%;额定电压:50V;温度系数:C0G;; Manufacturer: FOJAN(富捷); Symbol: FCC0402N180J500AT; AddInBom: yes; ModelId: 36a51122f27c49738f86b3bfa98863e0聨0819f05c4eef4c71ace90d822a990e87; ModelName: C0402_L1.0-W0.5-H0.5; ModelTransform: 39.37,19.685,0,0,0,0,0,0,0; Tolerance: ±5%; Voltage Rating: 50V; Temperature Coefficient: C0G; Device: FCC0402N180J500AT; LCSC Part Name: 18pF ±5% 50V; SupplierPart: C5137554; ManufacturerPart: FCC0402N180J500AT; Supplier Footprint: 0402; JLCPCB Part Class: Extended Part; Datasheet: https://item.szlcsc.com/datasheet/FCC0402N180J500AT/5747006.html; Supplier: LCSC; ConvertToPcb: yes; FootprintName: C0402; Value: 18pF; Operating Temperature: -55℃~+125℃
footprint C0402
pins: 1, 2

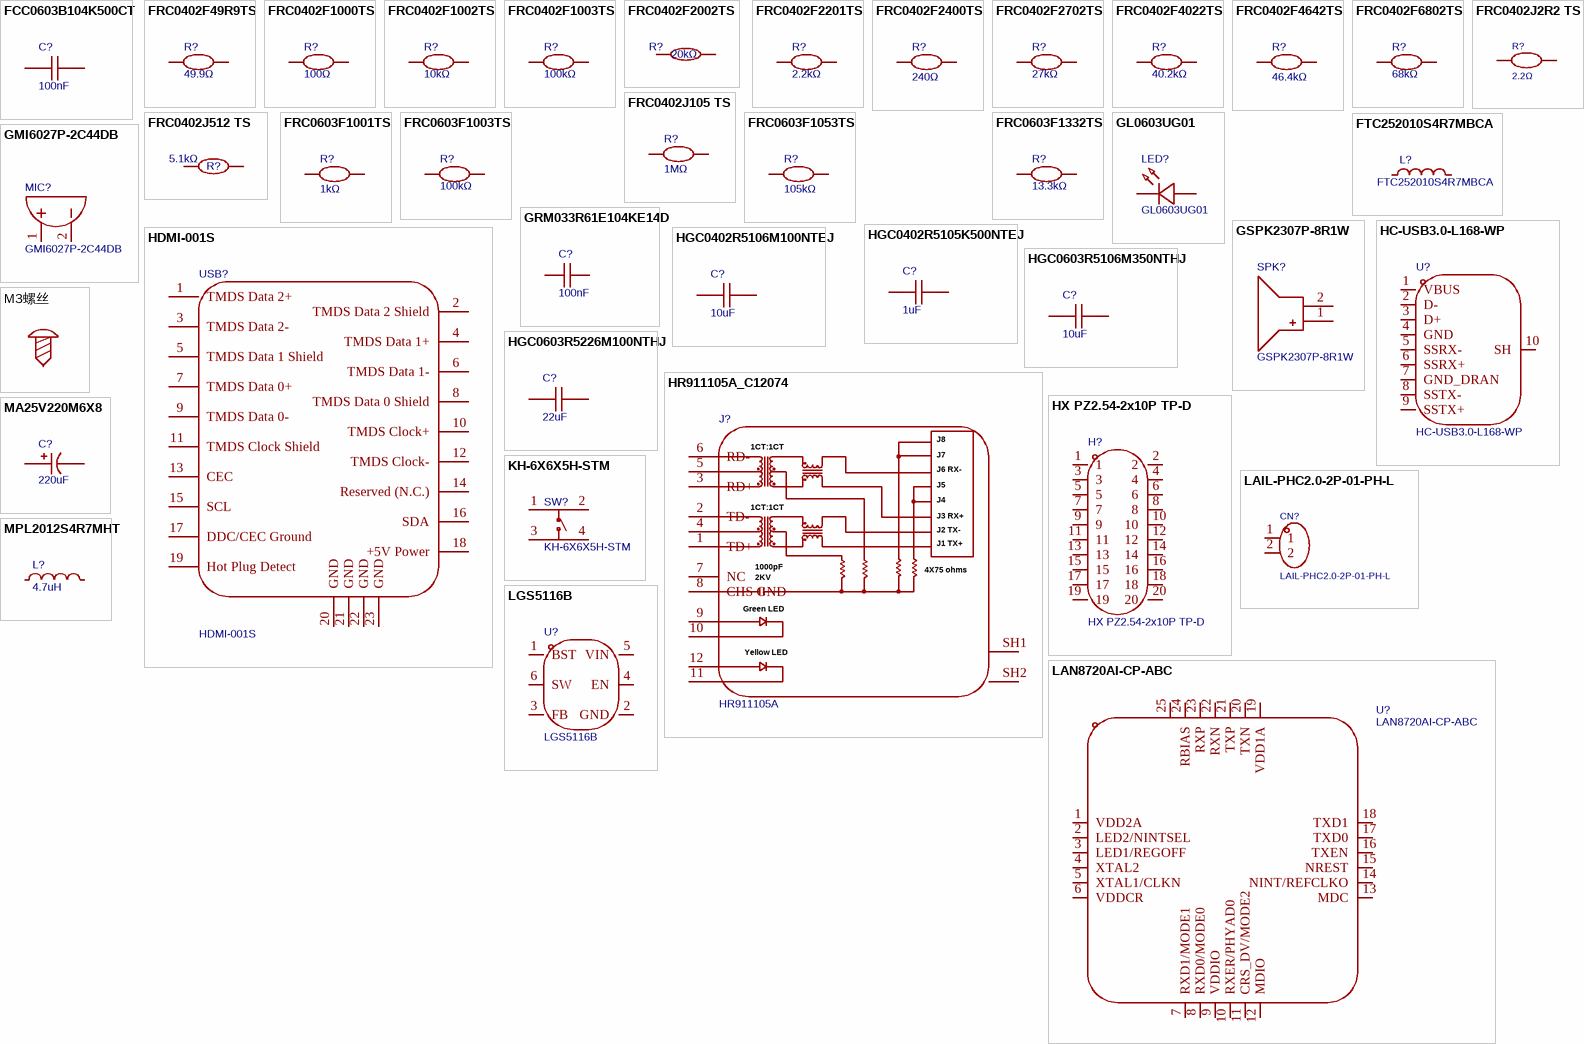
[diagram p1: symbols FCC0603B104K500CT to MPL2012S4R7MHT]

## FCC0603B104K500CT
designator C?, comment 100nF
容值:100nF;精度:±10%;额定电压:50V;温度系数:X7R;; Manufacturer: FOJAN(富捷); Symbol: FCC0603B104K500CT; AddInBom: yes; ModelId: ac125912035d415993ca9572d50418b1聨0819f05c4eef4c71ace90d822a990e87; ModelName: C0603_L1.6-W0.8-H0.8; ModelTransform: 62.992,31.496,0,0,0,0,0,0,0; Tolerance: ±10%; Voltage Rating: 50V; Temperature Coefficient: X7R; Device: FCC0603B104K500CT; LCSC Part Name: 100nF ±10% 50V; SupplierPart: C5137636; ManufacturerPart: FCC0603B104K500CT; Supplier Footprint: 0603; JLCPCB Part Class: Extended Part; Datasheet: https://item.szlcsc.com/datasheet/FCC0603B104K500CT/5747088.html; Supplier: LCSC; ConvertToPcb: yes; FootprintName: C0603; Value: 100nF; Operating Temperature: -55℃~+125℃
footprint C0603
pins: 1, 2

## FRC0402F49R9TS
designator R?, comment 49.9Ω
电阻类型:厚膜电阻;阻值:49.9Ω;精度:±1%;功率:62.5mW;工作电压:50V;温度系数:±100ppm/℃;; Manufacturer: FOJAN(富捷); Symbol: FRC0402F49R9TS; AddInBom: yes; ModelId: 98c88bc2b9094f218f3a3e30a7012738聨0819f05c4eef4c71ace90d822a990e87; ModelName: R0402_L1.0-W0.5-H0.4; ModelTransform: 39.37,19.685,0,0,0,0,0,0,0; Tolerance: ±1%; Power(Watts): 62.5mW; Voltage-Supply(Max): 50V; Device: FRC0402F49R9TS; LCSC Part Name: 49.9Ω ±1% 62.5mW 厚膜电阻; SupplierPart: C2933103; ManufacturerPart: FRC0402F49R9TS; Supplier Footprint: 0402; JLCPCB Part Class: Extended Part; Supplier: LCSC; ConvertToPcb: yes; FootprintName: R0402; Type: 厚膜电阻; Value: 49.9Ω; Temperature Coefficient: ±100ppm/℃; Operating Temperature: -55℃~+155℃
footprint R0402
pins: 1, 2

## FRC0402F1000TS
designator R?, comment 100Ω
电阻类型:厚膜电阻;阻值:100Ω;精度:±1%;功率:62.5mW;工作电压:50V;温度系数:±100ppm/℃;; Manufacturer: FOJAN(富捷); Symbol: FRC0402F1000TS; AddInBom: yes; ModelId: 98c88bc2b9094f218f3a3e30a7012738聨0819f05c4eef4c71ace90d822a990e87; ModelName: R0402_L1.0-W0.5-H0.4; ModelTransform: 39.37,19.685,0,0,0,0,0,0,0; Tolerance: ±1%; Power(Watts): 62.5mW; Voltage-Supply(Max): 50V; Device: FRC0402F1000TS; LCSC Part Name: 100Ω ±1% 62.5mW 厚膜电阻; SupplierPart: C2906860; ManufacturerPart: FRC0402F1000TS; Supplier Footprint: 0402; JLCPCB Part Class: Extended Part; Datasheet: https://item.szlcsc.com/datasheet/FRC0402F1000TS/3180373.html; Supplier: LCSC; ConvertToPcb: yes; FootprintName: R0402; Type: 厚膜电阻; Value: 100Ω; Temperature Coefficient: ±100ppm/℃; Operating Temperature: -55℃~+155℃
footprint R0402
pins: 1, 2

## FRC0402F1002TS
designator R?, comment 10kΩ
电阻类型:厚膜电阻;阻值:10kΩ;精度:±1%;功率:62.5mW;工作电压:50V;温度系数:±100ppm/℃;; Manufacturer: FOJAN(富捷); Symbol: FRC0402F1002TS; 3D Model: 98c88bc2b9094f218f3a3e30a7012738聨0819f05c4eef4c71ace90d822a990e87; 3D Model Transform: 39.37,19.685,0,0,0,0,0,0,0; Tolerance: ±1%; Power(Watts): 62.5mW; Voltage-Supply(Max): 50V; AddInBom: yes; ModelName: R0402_L1.0-W0.5-H0.4; Device: FRC0402F1002TS; LCSC Part Name: 10kΩ ±1% 62.5mW 厚膜电阻; Supplier Part: C2906861; Manufacturer Part: FRC0402F1002TS; Supplier Footprint: 0402; JLCPCB Part Class: Extended Part; Datasheet: https://item.szlcsc.com/datasheet/FRC0402F1002TS/3180374.html; Supplier: LCSC; Type: 厚膜电阻; Value: 10kΩ; Temperature Coefficient: ±100ppm/℃; Operating Temperature: -55℃~+155℃; ConvertToPcb: yes; FootprintName: R0402
footprint R0402
3D model R0402_L1.0-W0.5-H0.4
pins: 1, 2

## FRC0402F1003TS
designator R?, comment 100kΩ
电阻类型:厚膜电阻;阻值:100kΩ;精度:±1%;功率:62.5mW;工作电压:50V;温度系数:±100ppm/℃;; Manufacturer: FOJAN(富捷); Symbol: FRC0402F1003TS; AddInBom: yes; ModelId: 98c88bc2b9094f218f3a3e30a7012738聨0819f05c4eef4c71ace90d822a990e87; ModelName: R0402_L1.0-W0.5-H0.4; ModelTransform: 39.37,19.685,0,0,0,0,0,0,0; Tolerance: ±1%; Power(Watts): 62.5mW; Voltage-Supply(Max): 50V; Device: FRC0402F1003TS; LCSC Part Name: 100kΩ ±1% 62.5mW 厚膜电阻; SupplierPart: C2906859; ManufacturerPart: FRC0402F1003TS; Supplier Footprint: 0402; JLCPCB Part Class: Extended Part; Datasheet: https://item.szlcsc.com/datasheet/FRC0402F1003TS/3180372.html; Supplier: LCSC; ConvertToPcb: yes; FootprintName: R0402; Type: 厚膜电阻; Value: 100kΩ; Temperature Coefficient: ±100ppm/℃; Operating Temperature: -55℃~+155℃
footprint R0402
pins: 1, 2

## FRC0402F2002TS
designator R?, comment 20kΩ
电阻类型:厚膜电阻;阻值:20kΩ;精度:±1%;功率:62.5mW;工作电压:50V;温度系数:±100ppm/℃;; Manufacturer: FOJAN(富捷); Symbol: FRC0402F2002TS; AddInBom: yes; ModelId: 98c88bc2b9094f218f3a3e30a7012738聨0819f05c4eef4c71ace90d822a990e87; ModelName: R0402_L1.0-W0.5-H0.4; ModelTransform: 39.37,19.685,0,0,0,0,0,0,0; Tolerance: ±1%; Power(Watts): 62.5mW; Voltage-Supply(Max): 50V; Device: FRC0402F2002TS; LCSC Part Name: 20kΩ ±1% 62.5mW 厚膜电阻; SupplierPart: C2906867; ManufacturerPart: FRC0402F2002TS; Supplier Footprint: 0402; JLCPCB Part Class: Extended Part; Datasheet: https://item.szlcsc.com/datasheet/FRC0402F2002TS/3180380.html; Supplier: LCSC; ConvertToPcb: yes; FootprintName: R0402; Type: 厚膜电阻; Value: 20kΩ; Temperature Coefficient: ±100ppm/℃; Operating Temperature: -55℃~+155℃
footprint R0402
pins: 1, 2

## FRC0402F2201TS
designator R?, comment 2.2kΩ
电阻类型:厚膜电阻;阻值:2.2kΩ;精度:±1%;功率:62.5mW;工作电压:50V;温度系数:±100ppm/℃;; Manufacturer: FOJAN(富捷); Symbol: FRC0402F2201TS; AddInBom: yes; ModelId: 98c88bc2b9094f218f3a3e30a7012738聨0819f05c4eef4c71ace90d822a990e87; ModelName: R0402_L1.0-W0.5-H0.4; ModelTransform: 39.37,19.685,0,0,0,0,0,0,0; Tolerance: ±1%; Power(Watts): 62.5mW; Voltage-Supply(Max): 50V; Device: FRC0402F2201TS; LCSC Part Name: 2.2kΩ ±1% 62.5mW 厚膜电阻; SupplierPart: C2906865; ManufacturerPart: FRC0402F2201TS; Supplier Footprint: 0402; JLCPCB Part Class: Extended Part; Datasheet: https://item.szlcsc.com/datasheet/FRC0402F2201TS/3180378.html; Supplier: LCSC; ConvertToPcb: yes; FootprintName: R0402; Type: 厚膜电阻; Value: 2.2kΩ; Temperature Coefficient: ±100ppm/℃; Operating Temperature: -55℃~+155℃
footprint R0402
pins: 1, 2

## FRC0402F2400TS
designator R?, comment 240Ω
电阻类型:厚膜电阻;阻值:240Ω;精度:±1%;功率:62.5mW;工作电压:50V;温度系数:±100ppm/℃;; Manufacturer: FOJAN(富捷); Symbol: FRC0402F2400TS; AddInBom: yes; ModelId: 98c88bc2b9094f218f3a3e30a7012738聨0819f05c4eef4c71ace90d822a990e87; ModelName: R0402_L1.0-W0.5-H0.4; ModelTransform: 39.37,19.685,0,0,0,0,0,0,0; Tolerance: ±1%; Power(Watts): 62.5mW; Voltage-Supply(Max): 50V; Device: FRC0402F2400TS; LCSC Part Name: 240Ω ±1% 62.5mW 厚膜电阻; SupplierPart: C2909339; ManufacturerPart: FRC0402F2400TS; Supplier Footprint: 0402; JLCPCB Part Class: Extended Part; Datasheet: https://item.szlcsc.com/datasheet/FRC0402F2400TS/3186274.html; Supplier: LCSC; ConvertToPcb: yes; FootprintName: R0402; Type: 厚膜电阻; Value: 240Ω; Temperature Coefficient: ±100ppm/℃; Operating Temperature: -55℃~+155℃
footprint R0402
pins: 1, 2

## FRC0402F2702TS
designator R?, comment 27kΩ
电阻类型:厚膜电阻;阻值:27kΩ;精度:±1%;功率:62.5mW;工作电压:50V;温度系数:±100ppm/℃;; Manufacturer: FOJAN(富捷); Symbol: FRC0402F2702TS; AddInBom: yes; ModelId: 98c88bc2b9094f218f3a3e30a7012738聨0819f05c4eef4c71ace90d822a990e87; ModelName: R0402_L1.0-W0.5-H0.4; ModelTransform: 39.37,19.685,0,0,0,0,0,0,0; Tolerance: ±1%; Power(Watts): 62.5mW; Voltage-Supply(Max): 50V; Device: FRC0402F2702TS; LCSC Part Name: 27kΩ ±1% 62.5mW 厚膜电阻; SupplierPart: C2933084; ManufacturerPart: FRC0402F2702TS; Supplier Footprint: 0402; JLCPCB Part Class: Extended Part; Datasheet: https://item.szlcsc.com/datasheet/FRC0402F2702TS/3279186.html; Supplier: LCSC; ConvertToPcb: yes; FootprintName: R0402; Type: 厚膜电阻; Value: 27kΩ; Temperature Coefficient: ±100ppm/℃; Operating Temperature: -55℃~+155℃
footprint R0402
pins: 1, 2

## FRC0402F4022TS
designator R?, comment 40.2kΩ
电阻类型:厚膜电阻;阻值:40.2kΩ;精度:±1%;功率:62.5mW;工作电压:50V;温度系数:±100ppm/℃;; Manufacturer: FOJAN(富捷); Symbol: FRC0402F4022TS; AddInBom: yes; ModelId: 98c88bc2b9094f218f3a3e30a7012738聨0819f05c4eef4c71ace90d822a990e87; ModelName: R0402_L1.0-W0.5-H0.4; ModelTransform: 39.37,19.685,0,0,0,0,0,0,0; Tolerance: ±1%; Power(Watts): 62.5mW; Voltage-Supply(Max): 50V; Device: FRC0402F4022TS; LCSC Part Name: 40.2kΩ ±1% 62.5mW 厚膜电阻; SupplierPart: C2933097; ManufacturerPart: FRC0402F4022TS; Supplier Footprint: 0402; JLCPCB Part Class: Extended Part; Datasheet: https://item.szlcsc.com/datasheet/FRC0402F4022TS/3279199.html; Supplier: LCSC; ConvertToPcb: yes; FootprintName: R0402; Type: 厚膜电阻; Value: 40.2kΩ; Temperature Coefficient: ±100ppm/℃; Operating Temperature: -55℃~+155℃
footprint R0402
pins: 1, 2

## FRC0402F4642TS
designator R?, comment 46.4kΩ
电阻类型:厚膜电阻;阻值:46.4kΩ;精度:±1%;功率:62.5mW;工作电压:50V;温度系数:±100ppm/℃;; Manufacturer: FOJAN(富捷); Symbol: FRC0402F4642TS; AddInBom: yes; ModelId: 98c88bc2b9094f218f3a3e30a7012738聨0819f05c4eef4c71ace90d822a990e87; ModelName: R0402_L1.0-W0.5-H0.4; ModelTransform: 39.37,19.685,0,0,0,0,0,0,0; Tolerance: ±1%; Power(Watts): 62.5mW; Voltage-Supply(Max): 50V; Device: FRC0402F4642TS; LCSC Part Name: 46.4kΩ ±1% 62.5mW 厚膜电阻; SupplierPart: C5126026; ManufacturerPart: FRC0402F4642TS; Supplier Footprint: 0402; JLCPCB Part Class: Extended Part; Datasheet: https://item.szlcsc.com/datasheet/FRC0402F4642TS/5726373.html; Supplier: LCSC; ConvertToPcb: yes; FootprintName: R0402; Type: 厚膜电阻; Value: 46.4kΩ; Temperature Coefficient: ±100ppm/℃; Operating Temperature: -55℃~+155℃
footprint R0402
pins: 1, 2

## FRC0402F6802TS
designator R?, comment 68kΩ
电阻类型:厚膜电阻;阻值:68kΩ;精度:±1%;功率:62.5mW;工作电压:50V;温度系数:±100ppm/℃;; Manufacturer: FOJAN(富捷); Symbol: FRC0402F6802TS; AddInBom: yes; ModelId: 98c88bc2b9094f218f3a3e30a7012738聨0819f05c4eef4c71ace90d822a990e87; ModelName: R0402_L1.0-W0.5-H0.4; ModelTransform: 39.37,19.685,0,0,0,0,0,0,0; Tolerance: ±1%; Power(Watts): 62.5mW; Voltage-Supply(Max): 50V; Device: FRC0402F6802TS; LCSC Part Name: 68kΩ ±1% 62.5mW 厚膜电阻; SupplierPart: C2909379; ManufacturerPart: FRC0402F6802TS; Supplier Footprint: 0402; JLCPCB Part Class: Extended Part; Datasheet: https://item.szlcsc.com/datasheet/FRC0402F6802TS/3186314.html; Supplier: LCSC; ConvertToPcb: yes; FootprintName: R0402; Type: 厚膜电阻; Value: 68kΩ; Temperature Coefficient: ±100ppm/℃; Operating Temperature: -55℃~+155℃
footprint R0402
pins: 1, 2

## FRC0402J2R2 TS
designator R?, comment 2.2Ω
电阻类型:厚膜电阻;阻值:2.2Ω;精度:±5%;功率:62.5mW;工作电压:50V;温度系数:±400ppm/℃;; Manufacturer: FOJAN(富捷); Symbol: FRC0402J2R2 TS; AddInBom: yes; ModelId: 98c88bc2b9094f218f3a3e30a7012738聨0819f05c4eef4c71ace90d822a990e87; ModelName: R0402_L1.0-W0.5-H0.4; ModelTransform: 39.37,19.685,0,0,0,0,0,0,0; Tolerance: ±5%; Power(Watts): 62.5mW; Voltage-Supply(Max): 50V; Device: FRC0402J2R2 TS; LCSC Part Name: FRC0402J2R2 TS; SupplierPart: C2906903; ManufacturerPart: FRC0402J2R2 TS; Supplier Footprint: 0402; JLCPCB Part Class: Extended Part; Datasheet: https://item.szlcsc.com/datasheet/FRC0402J2R2%2520TS/3180416.html; Supplier: LCSC; ConvertToPcb: yes; FootprintName: R0402; Type: 厚膜电阻; Value: 2.2Ω; Temperature Coefficient: ±400ppm/℃; Operating Temperature: -55℃~+155℃
footprint R0402
pins: 1, 2

## FRC0402J105 TS
designator R?, comment 1MΩ
电阻类型:厚膜电阻;阻值:1MΩ;精度:±5%;功率:62.5mW;工作电压:50V;温度系数:±100ppm/℃;; Manufacturer: FOJAN(富捷); Symbol: FRC0402J105 TS; AddInBom: yes; ModelId: 98c88bc2b9094f218f3a3e30a7012738聨0819f05c4eef4c71ace90d822a990e87; ModelName: R0402_L1.0-W0.5-H0.4; ModelTransform: 39.37,19.685,0,0,0,0,0,0,0; Tolerance: ±5%; Power(Watts): 62.5mW; Voltage-Supply(Max): 50V; Device: FRC0402J105 TS; LCSC Part Name: 1MΩ ±5% 62.5mW 厚膜电阻; SupplierPart: C2906900; ManufacturerPart: FRC0402J105 TS; Supplier Footprint: 0402; JLCPCB Part Class: Extended Part; Supplier: LCSC; ConvertToPcb: yes; FootprintName: R0402; Type: 厚膜电阻; Value: 1MΩ; Temperature Coefficient: ±100ppm/℃; Operating Temperature: -55℃~+155℃
footprint R0402
pins: 1, 2

## FRC0402J512 TS
designator R?, comment 5.1kΩ
电阻类型:厚膜电阻;阻值:5.1kΩ;精度:±5%;功率:62.5mW;工作电压:50V;温度系数:±100ppm/℃;; Manufacturer: FOJAN(富捷); Symbol: FRC0402J512 TS; AddInBom: yes; ModelId: 98c88bc2b9094f218f3a3e30a7012738聨0819f05c4eef4c71ace90d822a990e87; ModelName: R0402_L1.0-W0.5-H0.4; ModelTransform: 39.37,19.685,0,0,0,0,0,0,0; Tolerance: ±5%; Power(Watts): 62.5mW; Voltage-Supply(Max): 50V; Device: FRC0402J512 TS; LCSC Part Name: 5.1kΩ ±5% 62.5mW 厚膜电阻; SupplierPart: C2906948; ManufacturerPart: FRC0402J512 TS; Supplier Footprint: 0402; JLCPCB Part Class: Extended Part; Datasheet: https://item.szlcsc.com/datasheet/FRC0402J512%2520TS/3180461.html; Supplier: LCSC; ConvertToPcb: yes; FootprintName: R0402; Type: 厚膜电阻; Value: 5.1kΩ; Temperature Coefficient: ±100ppm/℃; Operating Temperature: -55℃~+155℃
footprint R0402
pins: 1, 2

## FRC0603F1001TS
designator R?, comment 1kΩ
电阻类型:厚膜电阻;阻值:1kΩ;精度:±1%;功率:100mW;工作电压:75V;温度系数:±100ppm/℃;; Manufacturer: FOJAN(富捷); Symbol: FRC0603F1001TS; AddInBom: yes; ModelId: fc143cca1e79419f9cd78b61e9279f08聨0819f05c4eef4c71ace90d822a990e87; ModelName: R0603; ModelTransform: 31.8897,63.7794,0,90,0,0,0,0,0; Tolerance: ±1%; Power(Watts): 100mW; Voltage-Supply(Max): 75V; Device: FRC0603F1001TS; LCSC Part Name: 1kΩ ±1% 100mW 厚膜电阻; SupplierPart: C2907002; ManufacturerPart: FRC0603F1001TS; Supplier Footprint: 0603; JLCPCB Part Class: Extended Part; Datasheet: https://item.szlcsc.com/datasheet/FRC0603F1001TS/3180515.html; Supplier: LCSC; ConvertToPcb: yes; FootprintName: R0603; Type: 厚膜电阻; Value: 1kΩ; Temperature Coefficient: ±100ppm/℃; Operating Temperature: -55℃~+155℃
footprint R0603
pins: 1, 2

## FRC0603F1003TS
designator R?, comment 100kΩ
电阻类型:厚膜电阻;阻值:100kΩ;精度:±1%;功率:100mW;工作电压:75V;温度系数:±100ppm/℃;; Manufacturer: FOJAN(富捷); Symbol: FRC0603F1003TS; AddInBom: yes; ModelId: fc143cca1e79419f9cd78b61e9279f08聨0819f05c4eef4c71ace90d822a990e87; ModelName: R0603; ModelTransform: 31.8897,63.7794,0,90,0,0,0,0,0; Tolerance: ±1%; Power(Watts): 100mW; Voltage-Supply(Max): 75V; Device: FRC0603F1003TS; LCSC Part Name: 100kΩ ±1% 100mW 厚膜电阻; SupplierPart: C2906980; ManufacturerPart: FRC0603F1003TS; Supplier Footprint: 0603; JLCPCB Part Class: Extended Part; Datasheet: https://item.szlcsc.com/datasheet/FRC0603F1003TS/3180493.html; Supplier: LCSC; ConvertToPcb: yes; FootprintName: R0603; Type: 厚膜电阻; Value: 100kΩ; Temperature Coefficient: ±100ppm/℃; Operating Temperature: -55℃~+155℃
footprint R0603
pins: 1, 2

## FRC0603F1053TS
designator R?, comment 105kΩ
电阻类型:厚膜电阻;阻值:105kΩ;精度:±1%;功率:100mW;工作电压:75V;温度系数:±100ppm/℃;; Manufacturer: FOJAN(富捷); Symbol: FRC0603F1053TS; AddInBom: yes; ModelId: fc143cca1e79419f9cd78b61e9279f08聨0819f05c4eef4c71ace90d822a990e87; ModelName: R0603; ModelTransform: 31.8897,63.7794,0,90,0,0,0,0,0; Tolerance: ±1%; Power(Watts): 100mW; Voltage-Supply(Max): 75V; Device: FRC0603F1053TS; LCSC Part Name: 105kΩ ±1% 100mW 厚膜电阻; SupplierPart: C2933128; ManufacturerPart: FRC0603F1053TS; Supplier Footprint: 0603; JLCPCB Part Class: Extended Part; Supplier: LCSC; ConvertToPcb: yes; FootprintName: R0603; Type: 厚膜电阻; Value: 105kΩ; Temperature Coefficient: ±100ppm/℃; Operating Temperature: -55℃~+155℃
footprint R0603
pins: 1, 2

## FRC0603F1332TS
designator R?, comment 13.3kΩ
电阻类型:厚膜电阻;阻值:13.3kΩ;精度:±1%;功率:100mW;工作电压:75V;温度系数:±100ppm/℃;; Manufacturer: FOJAN(富捷); Symbol: FRC0603F1332TS; AddInBom: yes; ModelId: fc143cca1e79419f9cd78b61e9279f08聨0819f05c4eef4c71ace90d822a990e87; ModelName: R0603; ModelTransform: 31.8897,63.7794,0,90,0,0,0,0,0; Tolerance: ±1%; Power(Watts): 100mW; Voltage-Supply(Max): 75V; Device: FRC0603F1332TS; LCSC Part Name: 13.3kΩ ±1% 100mW 厚膜电阻; SupplierPart: C2933140; ManufacturerPart: FRC0603F1332TS; Supplier Footprint: 0603; JLCPCB Part Class: Extended Part; Supplier: LCSC; ConvertToPcb: yes; FootprintName: R0603; Type: 厚膜电阻; Value: 13.3kΩ; Temperature Coefficient: ±100ppm/℃; Operating Temperature: -55℃~+155℃
footprint R0603
pins: 1, 2